# Altium footprint library Pulsometro.PcbLib: 9 footprints
Each footprint in its own frame and in the unit in brackets; x right, y up, seen from the top. Pads: shape width x height; smd on the part's side, far side on the other; paste and mask are expansions set on the pad; w line width, h text height; cw(c..) or ccw(c..) is an arc to the next point about the centre after c.
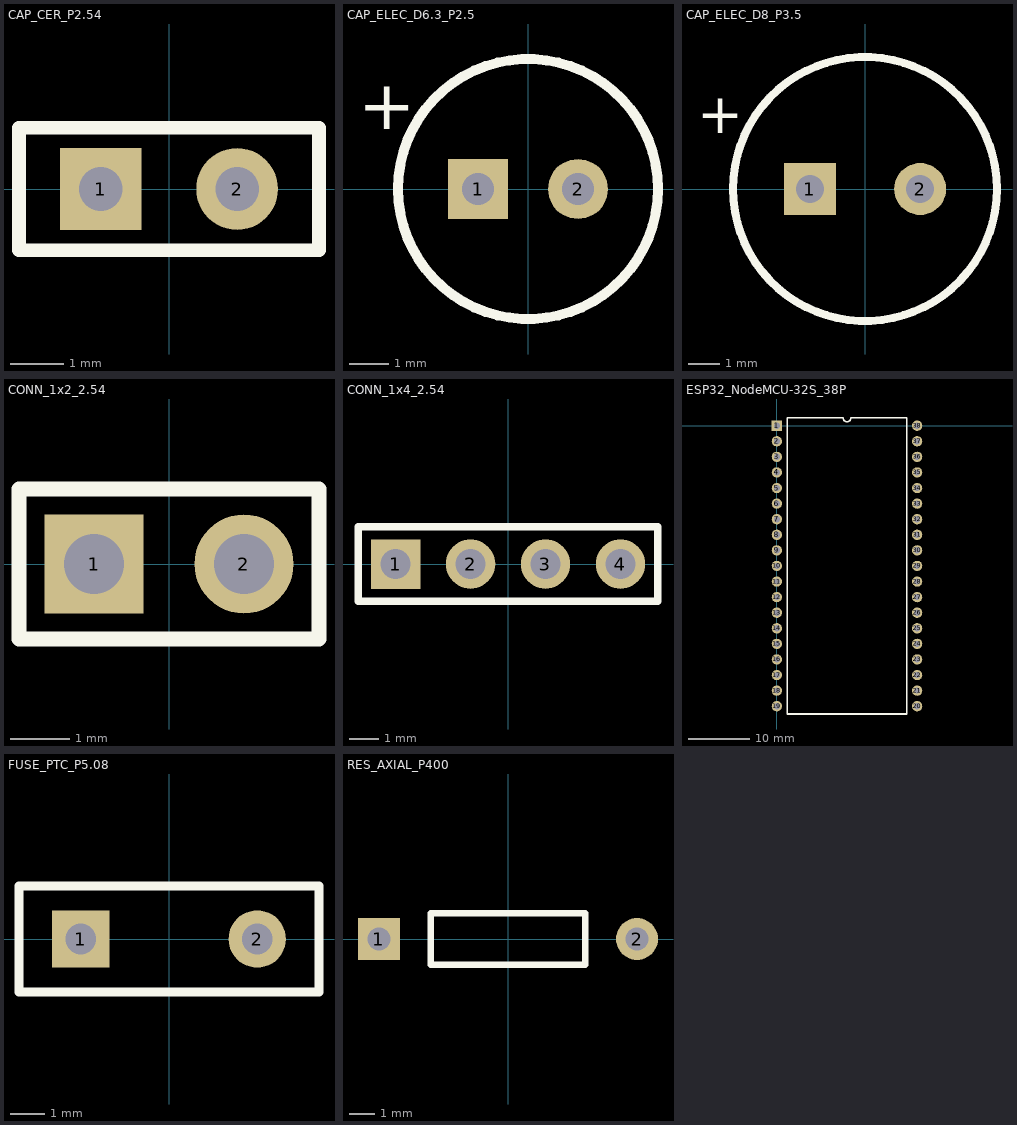
[diagram p0: the footprints below, top view; thin cyan lines are the x and y axes]

## CAP_CER_P2.54 [mil] "Capacitor ceramico paso 2.54 mm"
pads (2):
  rect 60x60 hole 32: 1(-50,0)
  round 60 hole 32: 2(50,0)
Top Overlay:
  lines w10: -110,-45 110,-45 110,45 -110,45 -110,-45

## CAP_ELEC_D6.3_P2.5 [mil] "Electrolitico radial 6.3 mm paso 2.5 mm (100uF)"
pads (2):
  rect 60x60 hole 32: 1(-50,0)
  round 60 hole 32: 2(50,0)
Top Overlay:
  circle w10: c0,0 r130
  text "+" at -170,60 h50

## CAP_ELEC_D8_P3.5 [mil] "Electrolitico radial 8 mm paso 3.5 mm (470uF)"
pads (2):
  rect 65x65 hole 35: 1(-69,0)
  round 65 hole 35: 2(69,0)
Top Overlay:
  circle w10: c0,0 r165
  text "+" at -210,70 h50

## CONN_1x2_2.54 [mil] "Tira de pines 1x2 paso 2.54 mm"
pads (2):
  rect 66x66 hole 40: 1(-50,0)
  round 66 hole 40: 2(50,0)
Top Overlay:
  lines w10: -100,-50 100,-50 100,50 -100,50 -100,-50

## CONN_1x4_2.54 [mil] "Tira de pines 1x4 paso 2.54 mm"
pads (4):
  rect 66x66 hole 40: 1(-150,0)
  round 66 hole 40: 2(-50,0) 3(50,0) 4(150,0)
Top Overlay:
  lines w10: -200,-50 200,-50 200,50 -200,50 -200,-50

## ESP32_NodeMCU-32S_38P [mil]
pads (38):
  rect 66x66 hole 40: 1(0,0)
  round 66 hole 40: 2(0,-100) 3(0,-200) 4(0,-300) 5(0,-400) 6(0,-500) 7(0,-600) 8(0,-700) 9(0,-800) 10(0,-900) 11(0,-1000) 12(0,-1100) 13(0,-1200) 14(0,-1300) 15(0,-1400) 16(0,-1500) 17(0,-1600) 18(0,-1700) 19(0,-1800) 20(900,-1800) 21(900,-1700) 22(900,-1600) 23(900,-1500) 24(900,-1400) 25(900,-1300) 26(900,-1200) 27(900,-1100) 28(900,-1000) 29(900,-900) 30(900,-800) 31(900,-700) 32(900,-600) 33(900,-500) 34(900,-400) 35(900,-300) 36(900,-200) 37(900,-100) 38(900,0)
Top Overlay:
  lines w10: 68,-1850 832,-1850 832,50 475,50 cw(c450,50) 425,50 68,50 68,-1850

## FUSE_PTC_P5.08 [mil] "Fusible PTC radial paso 5.08 mm"
pads (2):
  rect 65x65 hole 35: 1(-100,0)
  round 65 hole 35: 2(100,0)
Top Overlay:
  lines w10: -170,-60 170,-60 170,60 -170,60 -170,-60

## Pulsometro.PcbLib [mil]

## RES_AXIAL_P400 [mil] "Resistencia axial 1/4 W paso 400 mil"
pads (2):
  rect 65x65 hole 35: 1(-200,0)
  round 65 hole 35: 2(200,0)
Top Overlay:
  lines w10: -120,-40 120,-40 120,40 -120,40 -120,-40